# Altium schematic symbol library V3-BAT-HV-001.SchLib: 7 symbols
Pins are listed as number, name and electrical type; pins without a type are passive.

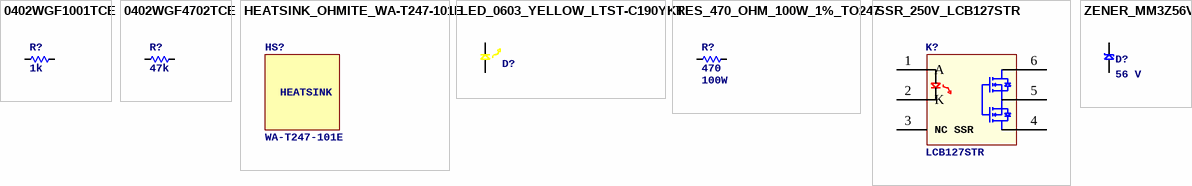
[diagram p0: symbols 0402WGF1001TCE to ZENER_MM3Z56VC]

## 0402WGF1001TCE
designator R?  value 1k  (hidden comment: 0402WGF1001TCE)
Manufacturer: UNI-ROYAL(Uniroyal Elec); Tolerance: 1%; Temperature Coefficient: Â±100ppm/â„ƒ; Power Rating (mW): 62.5; ComponentLink1Description: Datasheet; ComponentLink1URL: https://wmsc.lcsc.com/wmsc/upload/file/pdf/v2/lcsc/2206010216_UNI-ROYAL-Uniroyal-Elec-0402WGF1001TCE_C11702.pdf; Manufacturer Part Number: 0402WGF1001TCE; Package: 0402; Supplier 2: LCSC; Supplier Part Number 2: C11702
footprint R0402
pins: 1, 2

## 0402WGF4702TCE
designator R?  value 47k  (hidden comment: 0402WGF4702TCE)
Manufacturer: UNI-ROYAL(Uniroyal Elec); Tolerance: 1%; Temperature Coefficient: Â±100ppm/â„ƒ; Power Rating (mW): 62.5; Manufacturer Part Number: 0402WGF4702TCE; ComponentLink1Description: Datasheet; ComponentLink1URL: https://wmsc.lcsc.com/wmsc/upload/file/pdf/v2/lcsc/2206010100_UNI-ROYAL-Uniroyal-Elec-0402WGF4702TCE_C25792.pdf; Package: 0402; Supplier 2: LCSC; Supplier Part Number 2: C25792
footprint R0402
pins: 1, 2

## HEATSINK_OHMITE_WA-T247-101E
designator HS?, comment WA-T247-101E
Heat Sink, 11ohm, Extruded, Clip, Longitudinal, Aluminum Alloy, Anodized; Manufacturer: Ohmite; Supplier 1: Digikey; Supplier Part Number 1: WA-T247-101E-ND; Manufacturer Part Number: WA-T247-101E; ComponentLink1Description: Datasheet; ComponentLink1URL: https://www.ohmite.com/assets/images/sink-w.pdf
footprint OHMITE_WA-T247-101E
text: HEATSINK

## LED_0603_YELLOW_LTST-C190YKT
designator D?, comment LTST-C190YKT  (value not drawn)
LED YELLOW CLEAR 0603 SMD; Manufacturer: Lite-On Inc; Supplier 1: Digikey; ComponentLink1URL: https://mm.digikey.com/Volume0/opasdata/d220001/medias/docus/1176/LTST-C190YKT.pdf; ComponentLink1Description: Datasheet; Supplier Part Number 1: 160-1184-1-ND; Manufacturer Part Number: LTST-C190YKT; Supplier 2: LCSC; Supplier Part Number 2: C125097
footprint LED_0603P_YELLOW
pins: 1, 2

## RES_470_OHM_100W_1%_TO247
designator R?, comment Resistance (Ohms): 470  Power (Watts): 100W  (hidden comment: TEH100M470RJE)
RES TK FM 470 OHM 100W 1% TO247; Manufacturer: Ohmite; Supplier 1: Digikey; Manufacturer Part Number: TEH100M470RJE; ComponentLink1URL: http://www.ohmite.com/cat/res_teh100.pdf; ComponentLink1Description: Datasheet; Supplier Part Number 1: TEH100M470RJE-ND; Supplier 2: LCSC; Supplier Part Number 2: C2642463
footprint TO-247-2_VERTICAL
pins: 1, 2

## SSR_250V_LCB127STR
designator K?, comment LCB127STR
Relay Ssr 50MA 1.4V Dc-in 0.2A 250V Ac/dc-out 6-PIN PDIP SMD T/r; Manufacturer: IXYS; Supplier 1: Digikey; Supplier Part Number 1: 212-LCB127STRCT-ND; Manufacturer Part Number: LCB127STR; ComponentLink1Description: Datasheet; ComponentLink1URL: https://www.littelfuse.com/assetdocs/littelfuse-integrated-circuits-lcb127-datasheet?assetguid=ed9c03ce-9d8a-4952-b2f0-cdedc4b0af1f; Supplier 2: LCSC; Supplier Part Number 2: C6286119
footprint 6SMD300
pins: 1 A, 2 K, 3, 4, 5, 6
text: NC SSR

## ZENER_MM3Z56VC
designator D?, comment Voltage - Zener (Nom) (Vz): 56 V  (hidden comment: MM3Z56VC)
DIODE ZENER 56V 200MW SOD; Manufacturer: onsemi; Supplier 1: Digikey; Manufacturer Part Number: MM3Z56VC; ComponentLink1URL: https://www.onsemi.com/pdf/datasheet/mm3z9v1c-d.pdf; ComponentLink1Description: Datasheet; Supplier Part Number 1: 488-MM3Z56VCCT-ND; Supplier 2: LCSC; Supplier Part Number 2: C891632
footprint SOD323 (Molded Diode, 2-Leads, Body 1.7x1.3mm, IPC High Density)
pins: 1, 2